# Altium schematic symbol library UNIV_RES.SchLib: 1 symbol
Pins are listed as number, name and electrical type; pins without a type are passive.

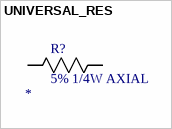
[diagram p0: symbol UNIVERSAL_RES]

## UNIVERSAL_RES
designator R?, comment 5% 1/4W AXIAL
RESISTOR; Copyright: Copyright (C) 2025 Ultra Librarian. All rights reserved.; Manufacturer: *; Manufacturer_Part_Number: *; Value: *
footprint STA_CF14_STP
pins: 1, 2